# Altium footprint library TQFP.PcbLib: 17 footprints (part 2 of 2)
Each footprint in its own frame and in the unit in brackets; x right, y up, seen from the top. Pads: shape width x height; smd on the part's side, far side on the other; paste and mask are expansions set on the pad; w line width, h text height; cw(c..) or ccw(c..) is an arc to the next point about the centre after c.
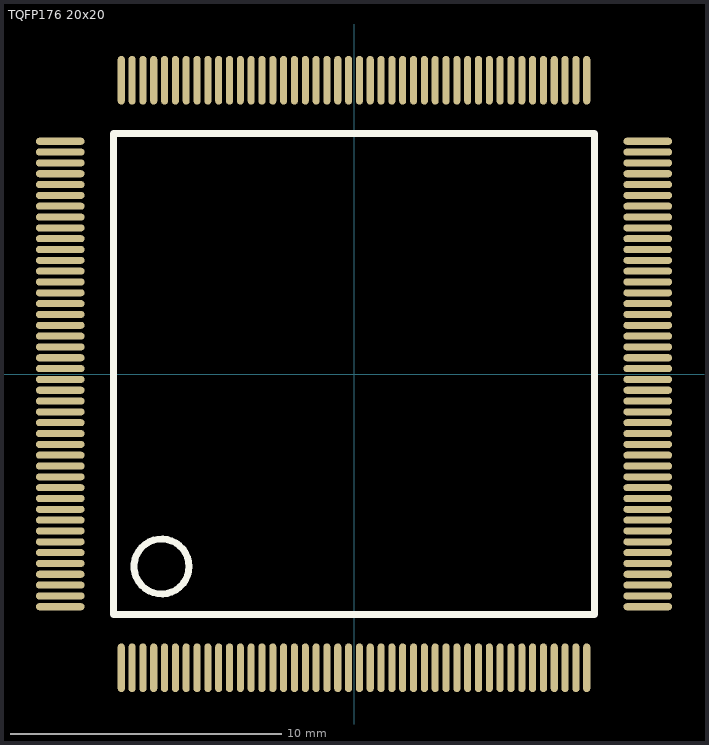
[diagram p1: the footprint, top view; thin cyan lines are the x and y axes]

## TQFP176 20x20 [mm]
pads (176):
  oval 0.26x1.8 smd: 1(-8.6,-10.857) 2(-8.2,-10.857) 3(-7.8,-10.857) 4(-7.4,-10.857) 5(-7,-10.857) 6(-6.6,-10.857) 7(-6.2,-10.857) 8(-5.8,-10.857) 9(-5.4,-10.857) 10(-5,-10.857) 11(-4.6,-10.857) 12(-4.2,-10.857) 13(-3.8,-10.857) 14(-3.4,-10.857) 15(-3,-10.857) 16(-2.6,-10.857) 17(-2.2,-10.857) 18(-1.8,-10.857) 19(-1.4,-10.857) 20(-1,-10.857) 21(-0.6,-10.857) 22(-0.2,-10.857) 23(0.2,-10.857) 24(0.6,-10.857) 25(1,-10.857) 26(1.4,-10.857) 27(1.8,-10.857) 28(2.2,-10.857) 29(2.6,-10.857) 30(3,-10.857) 31(3.4,-10.857) 32(3.8,-10.857) 33(4.2,-10.857) 34(4.6,-10.857) 35(5,-10.857) 36(5.4,-10.857) 37(5.8,-10.857) 38(6.2,-10.857) 39(6.6,-10.857) 40(7,-10.857) 41(7.4,-10.857) 42(7.8,-10.857) 43(8.2,-10.857) 44(8.6,-10.857) 89(8.6,10.857) 90(8.2,10.857) 91(7.8,10.857) 92(7.4,10.857) 93(7,10.857) 94(6.6,10.857) 95(6.2,10.857) 96(5.8,10.857) 97(5.4,10.857) 98(5,10.857) 99(4.6,10.857) 100(4.2,10.857) 101(3.8,10.857) 102(3.4,10.857) 103(3,10.857) 104(2.6,10.857) 105(2.2,10.857) 106(1.8,10.857) 107(1.4,10.857) 108(1,10.857) 109(0.6,10.857) 110(0.2,10.857) 111(-0.2,10.857) 112(-0.6,10.857) 113(-1,10.857) 114(-1.4,10.857) 115(-1.8,10.857) 116(-2.2,10.857) 117(-2.6,10.857) 118(-3,10.857) 119(-3.4,10.857) 120(-3.8,10.857) 121(-4.2,10.857) 122(-4.6,10.857) 123(-5,10.857) 124(-5.4,10.857) 125(-5.8,10.857) 126(-6.2,10.857) 127(-6.6,10.857) 128(-7,10.857) 129(-7.4,10.857) 130(-7.8,10.857) 131(-8.2,10.857) 132(-8.6,10.857)
  oval 1.8x0.26 smd: 45(10.857,-8.6) 46(10.857,-8.2) 47(10.857,-7.8) 48(10.857,-7.4) 49(10.857,-7) 50(10.857,-6.6) 51(10.857,-6.2) 52(10.857,-5.8) 53(10.857,-5.4) 54(10.857,-5) 55(10.857,-4.6) 56(10.857,-4.2) 57(10.857,-3.8) 58(10.857,-3.4) 59(10.857,-3) 60(10.857,-2.6) 61(10.857,-2.2) 62(10.857,-1.8) 63(10.857,-1.4) 64(10.857,-1) 65(10.857,-0.6) 66(10.857,-0.2) 67(10.857,0.2) 68(10.857,0.6) 69(10.857,1) 70(10.857,1.4) 71(10.857,1.8) 72(10.857,2.2) 73(10.857,2.6) 74(10.857,3) 75(10.857,3.4) 76(10.857,3.8) 77(10.857,4.2) 78(10.857,4.6) 79(10.857,5) 80(10.857,5.4) 81(10.857,5.8) 82(10.857,6.2) 83(10.857,6.6) 84(10.857,7) 85(10.857,7.4) 86(10.857,7.8) 87(10.857,8.2) 88(10.857,8.6) 133(-10.857,8.6) 134(-10.857,8.2) 135(-10.857,7.8) 136(-10.857,7.4) 137(-10.857,7) 138(-10.857,6.6) 139(-10.857,6.2) 140(-10.857,5.8) 141(-10.857,5.4) 142(-10.857,5) 143(-10.857,4.6) 144(-10.857,4.2) 145(-10.857,3.8) 146(-10.857,3.4) 147(-10.857,3) 148(-10.857,2.6) 149(-10.857,2.2) 150(-10.857,1.8) 151(-10.857,1.4) 152(-10.857,1) 153(-10.857,0.6) 154(-10.857,0.2) 155(-10.857,-0.2) 156(-10.857,-0.6) 157(-10.857,-1) 158(-10.857,-1.4) 159(-10.857,-1.8) 160(-10.857,-2.2) 161(-10.857,-2.6) 162(-10.857,-3) 163(-10.857,-3.4) 164(-10.857,-3.8) 165(-10.857,-4.2) 166(-10.857,-4.6) 167(-10.857,-5) 168(-10.857,-5.4) 169(-10.857,-5.8) 170(-10.857,-6.2) 171(-10.857,-6.6) 172(-10.857,-7) 173(-10.857,-7.4) 174(-10.857,-7.8) 175(-10.857,-8.2) 176(-10.857,-8.6)
Top Overlay:
  circle w0.254: c-7.112,-7.112 r1.016
  lines w0.254: -8.89,-8.89 -8.89,8.89 8.89,8.89 8.89,-8.89 -8.89,-8.89
3D body "TQFP176 20x20.STEP": height 1.05, standoff 0, extent -10.998,-11.006 11.006,10.998